# Altium footprint library Miscellaneous Header.PcbLib: 164 footprints (part 3 of 11)
Each footprint in its own frame and in the unit in brackets; x right, y up, seen from the top. Pads: shape width x height; smd on the part's side, far side on the other; paste and mask are expansions set on the pad; w line width, h text height; cw(c..) or ccw(c..) is an arc to the next point about the centre after c.
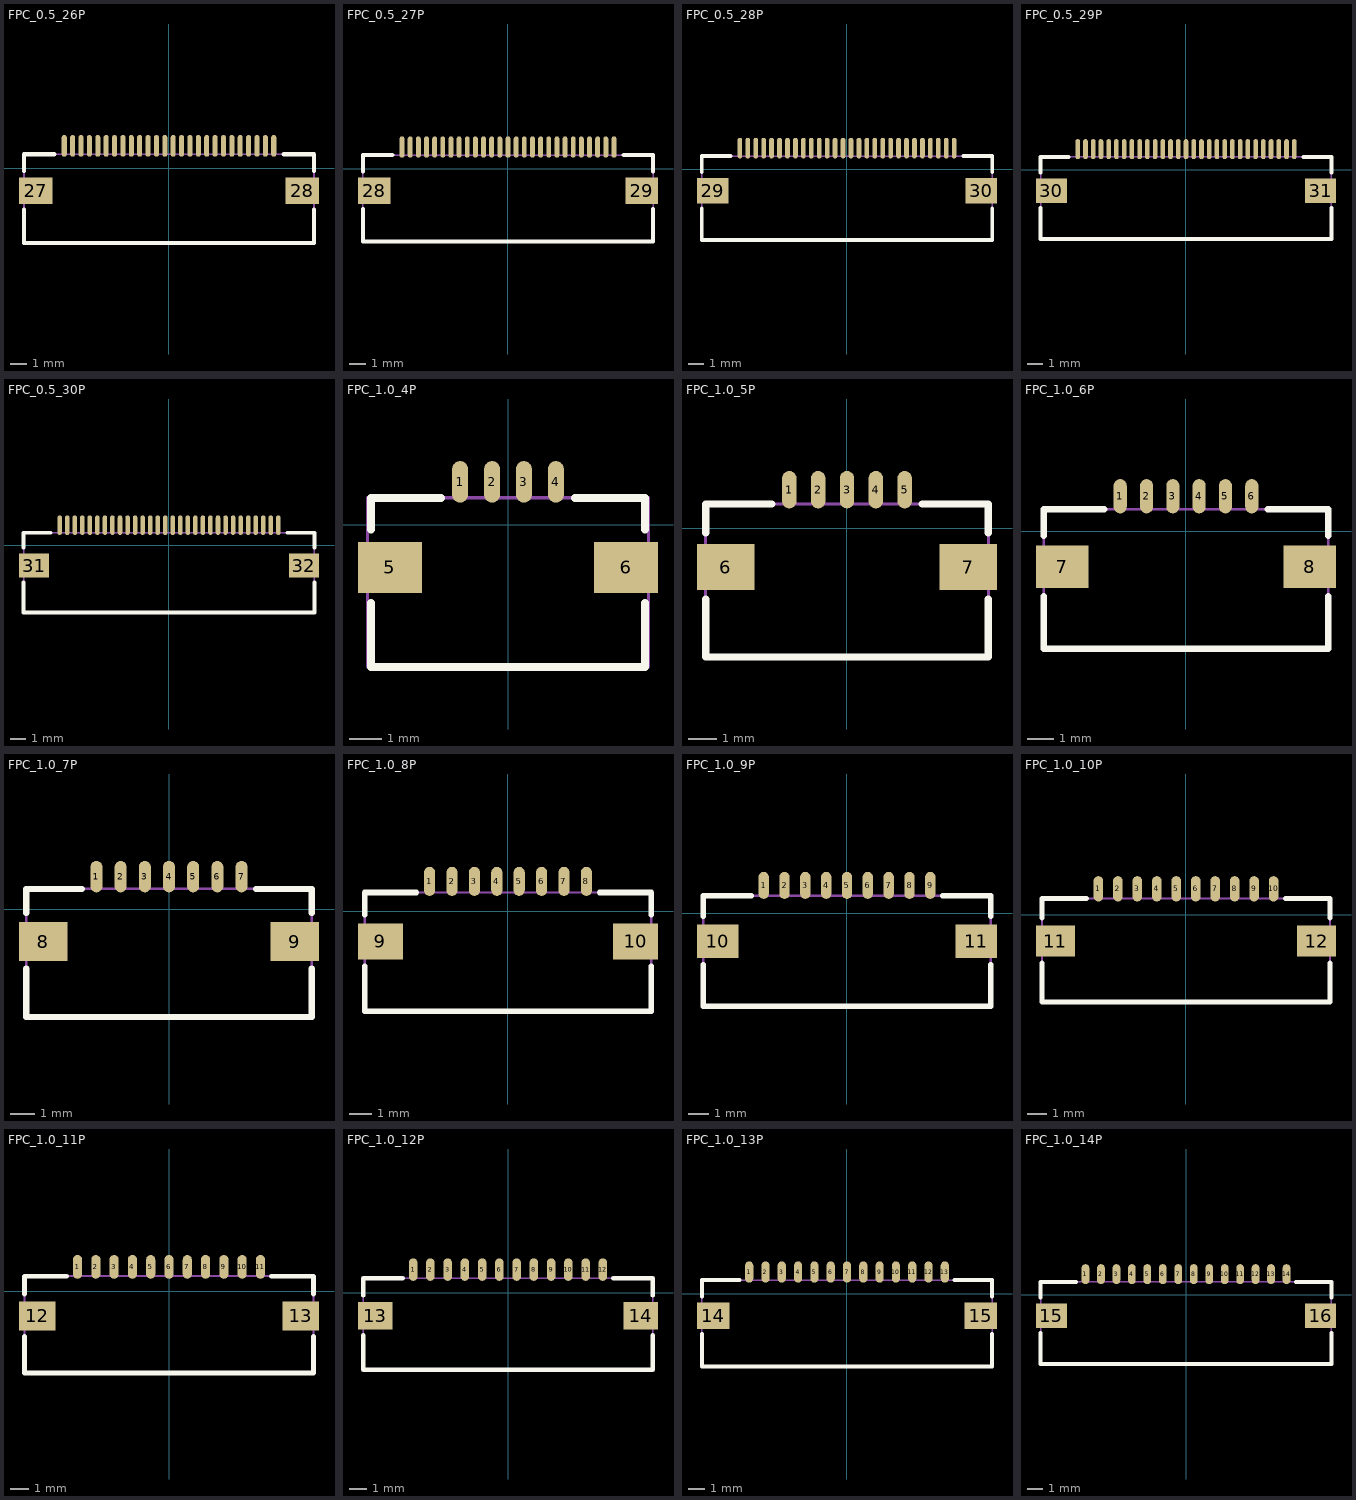
[diagram p2: the footprints below, top view; thin cyan lines are the x and y axes]

## FPC_0.5_26P [mm]
pads (28):
  oval 0.3x1.3 smd: 1(-6.25,1.34) 2(-5.75,1.34) 3(-5.25,1.34) 4(-4.75,1.34) 5(-4.25,1.34) 6(-3.75,1.34) 7(-3.25,1.34) 8(-2.75,1.34) 9(-2.25,1.34) 10(-1.75,1.34) 11(-1.25,1.34) 12(-0.75,1.34) 13(-0.25,1.34) 14(0.25,1.34) 15(0.75,1.34) 16(1.25,1.34) 17(1.75,1.34) 18(2.25,1.34) 19(2.75,1.34) 20(3.25,1.34) 21(3.75,1.34) 22(4.25,1.34) 23(4.75,1.34) 24(5.25,1.34) 25(5.75,1.34) 26(6.25,1.34)
  rect 2x1.6 smd: 27(-7.95,-1.34) 28(7.95,-1.34)
Top Overlay:
  lines w0.25: -8.65,-2.46 -8.65,-4.46 8.65,-4.46 8.65,-2.46 ; -8.65,-0.16 -8.65,0.84 -6.85,0.84 ; 6.85,0.84 8.65,0.84 8.65,-0.16
Mechanical 15:
  lines w0.1: -8.65,-4.46 8.65,-4.46 8.65,0.84 -8.65,0.84 -8.65,-4.46
3D body: height 2.2, standoff -0.05, extent -8.55,-4.799 8.55,1.7

## FPC_0.5_27P [mm]
pads (29):
  oval 0.3x1.3 smd: 1(-6.5,1.34) 2(-6,1.34) 3(-5.5,1.34) 4(-5,1.34) 5(-4.5,1.34) 6(-4,1.34) 7(-3.5,1.34) 8(-3,1.34) 9(-2.5,1.34) 10(-2,1.34) 11(-1.5,1.34) 12(-1,1.34) 13(-0.5,1.34) 14(0,1.34) 15(0.5,1.34) 16(1,1.34) 17(1.5,1.34) 18(2,1.34) 19(2.5,1.34) 20(3,1.34) 21(3.5,1.34) 22(4,1.34) 23(4.5,1.34) 24(5,1.34) 25(5.5,1.34) 26(6,1.34) 27(6.5,1.34)
  rect 2x1.6 smd: 28(-8.2,-1.34) 29(8.2,-1.34)
Top Overlay:
  lines w0.25: -8.9,-2.46 -8.9,-4.46 8.9,-4.46 8.9,-2.46 ; -8.9,-0.16 -8.9,0.84 -7.1,0.84 ; 7.1,0.84 8.9,0.84 8.9,-0.16
Mechanical 15:
  lines w0.1: -8.9,-4.46 -8.9,0.84 8.9,0.84 8.9,-4.46 -8.9,-4.46
3D body: height 2.2, standoff -0.05, extent -8.8,-4.799 8.8,1.7

## FPC_0.5_28P [mm]
pads (30):
  oval 0.3x1.3 smd: 1(-6.75,1.34) 2(-6.25,1.34) 3(-5.75,1.34) 4(-5.25,1.34) 5(-4.75,1.34) 6(-4.25,1.34) 7(-3.75,1.34) 8(-3.25,1.34) 9(-2.75,1.34) 10(-2.25,1.34) 11(-1.75,1.34) 12(-1.25,1.34) 13(-0.75,1.34) 14(-0.25,1.34) 15(0.25,1.34) 16(0.75,1.34) 17(1.25,1.34) 18(1.75,1.34) 19(2.25,1.34) 20(2.75,1.34) 21(3.25,1.34) 22(3.75,1.34) 23(4.25,1.34) 24(4.75,1.34) 25(5.25,1.34) 26(5.75,1.34) 27(6.25,1.34) 28(6.75,1.34)
  rect 2x1.6 smd: 29(-8.45,-1.34) 30(8.45,-1.34)
Top Overlay:
  lines w0.25: -9.15,-2.46 -9.15,-4.46 9.15,-4.46 9.15,-2.46 ; -9.15,-0.16 -9.15,0.84 -7.35,0.84 ; 7.35,0.84 9.15,0.84 9.15,-0.16
Mechanical 15:
  lines w0.1: -9.15,-4.46 9.15,-4.46 9.15,0.84 -9.15,0.84 -9.15,-4.46
3D body: height 2.2, standoff -0.05, extent -9.05,-4.799 9.05,1.7

## FPC_0.5_29P [mm]
pads (31):
  oval 0.3x1.3 smd: 1(-7,1.34) 2(-6.5,1.34) 3(-6,1.34) 4(-5.5,1.34) 5(-5,1.34) 6(-4.5,1.34) 7(-4,1.34) 8(-3.5,1.34) 9(-3,1.34) 10(-2.5,1.34) 11(-2,1.34) 12(-1.5,1.34) 13(-1,1.34) 14(-0.5,1.34) 15(0,1.34) 16(0.5,1.34) 17(1,1.34) 18(1.5,1.34) 19(2,1.34) 20(2.5,1.34) 21(3,1.34) 22(3.5,1.34) 23(4,1.34) 24(4.5,1.34) 25(5,1.34) 26(5.5,1.34) 27(6,1.34) 28(6.5,1.34) 29(7,1.34)
  rect 2x1.6 smd: 30(-8.7,-1.34) 31(8.7,-1.34)
Top Overlay:
  lines w0.25: -9.4,-2.46 -9.4,-4.46 9.4,-4.46 9.4,-2.46 ; -9.4,-0.16 -9.4,0.84 -7.6,0.84 ; 7.6,0.84 9.4,0.84 9.4,-0.16
Mechanical 15:
  lines w0.1: -9.4,-4.46 -9.4,0.84 9.4,0.84 9.4,-4.46 -9.4,-4.46
3D body: height 2.2, standoff -0.05, extent -9.3,-4.799 9.3,1.7

## FPC_0.5_30P [mm]
pads (32):
  oval 0.3x1.3 smd: 1(-7.25,1.34) 2(-6.75,1.34) 3(-6.25,1.34) 4(-5.75,1.34) 5(-5.25,1.34) 6(-4.75,1.34) 7(-4.25,1.34) 8(-3.75,1.34) 9(-3.25,1.34) 10(-2.75,1.34) 11(-2.25,1.34) 12(-1.75,1.34) 13(-1.25,1.34) 14(-0.75,1.34) 15(-0.25,1.34) 16(0.25,1.34) 17(0.75,1.34) 18(1.25,1.34) 19(1.75,1.34) 20(2.25,1.34) 21(2.75,1.34) 22(3.25,1.34) 23(3.75,1.34) 24(4.25,1.34) 25(4.75,1.34) 26(5.25,1.34) 27(5.75,1.34) 28(6.25,1.34) 29(6.75,1.34) 30(7.25,1.34)
  rect 2x1.6 smd: 31(-8.95,-1.34) 32(8.95,-1.34)
Top Overlay:
  lines w0.25: -9.65,-2.46 -9.65,-4.46 9.65,-4.46 9.65,-2.46 ; -9.65,-0.16 -9.65,0.84 -7.85,0.84 ; 7.85,0.84 9.65,0.84 9.65,-0.16
Mechanical 15:
  lines w0.1: -9.65,-4.46 9.65,-4.46 9.65,0.84 -9.65,0.84 -9.65,-4.46
3D body: height 2.2, standoff -0.05, extent -9.55,-4.799 9.55,1.7

## FPC_1.0_4P [mm]
pads (6):
  oval 0.5x1.3 smd: 1(-1.5,1.34) 2(-0.5,1.34) 3(0.5,1.34) 4(1.5,1.34)
  rect 2x1.6 smd: 5(-3.7,-1.34) 6(3.7,-1.34)
Top Overlay:
  lines w0.25: -4.3,-2.46 -4.3,-4.46 4.3,-4.46 4.3,-2.46 ; -4.3,-0.16 -4.3,0.84 -2.1,0.84 ; 2.1,0.84 4.3,0.84 4.3,-0.16
Mechanical 15:
  lines w0.1: -4.4,-4.46 -4.4,0.84 4.4,0.84 4.4,-4.46 -4.4,-4.46
3D body: height 2.2, standoff -0.05, extent -4.3,-4.86 4.3,1.639

## FPC_1.0_5P [mm]
pads (7):
  oval 0.5x1.3 smd: 1(-2,1.34) 2(-1,1.34) 3(0,1.34) 4(1,1.34) 5(2,1.34)
  rect 2x1.6 smd: 6(-4.2,-1.34) 7(4.2,-1.34)
Top Overlay:
  lines w0.25: -4.9,-2.46 -4.9,-4.46 4.9,-4.46 4.9,-2.46 ; -4.9,-0.16 -4.9,0.84 -2.6,0.84 ; 2.6,0.84 4.9,0.84 4.9,-0.16
Mechanical 15:
  lines w0.1: -4.9,-4.46 -4.9,0.84 4.9,0.84 4.9,-4.46 -4.9,-4.46
3D body: height 2.2, standoff -0.05, extent -4.8,-4.86 4.8,1.639

## FPC_1.0_6P [mm]
pads (8):
  oval 0.5x1.3 smd: 1(-2.5,1.34) 2(-1.5,1.34) 3(-0.5,1.34) 4(0.5,1.34) 5(1.5,1.34) 6(2.5,1.34)
  rect 2x1.6 smd: 7(-4.7,-1.34) 8(4.7,-1.34)
Top Overlay:
  lines w0.25: -5.4,-2.46 -5.4,-4.46 5.4,-4.46 5.4,-2.46 ; -5.4,-0.16 -5.4,0.84 -3.1,0.84 ; 3.1,0.84 5.4,0.84 5.4,-0.16
Mechanical 15:
  lines w0.1: -5.4,-4.46 -5.4,0.84 5.4,0.84 5.4,-4.46 -5.4,-4.46
3D body: height 2.2, standoff -0.05, extent -5.3,-4.86 5.3,1.639

## FPC_1.0_7P [mm]
pads (9):
  oval 0.5x1.3 smd: 1(-3,1.34) 2(-2,1.34) 3(-1,1.34) 4(0,1.34) 5(1,1.34) 6(2,1.34) 7(3,1.34)
  rect 2x1.6 smd: 8(-5.2,-1.34) 9(5.2,-1.34)
Top Overlay:
  lines w0.25: -5.9,-2.46 -5.9,-4.46 5.9,-4.46 5.9,-2.46 ; -5.9,-0.16 -5.9,0.84 -3.6,0.84 ; 3.6,0.84 5.9,0.84 5.9,-0.16
Mechanical 15:
  lines w0.1: -5.9,-4.46 5.9,-4.46 5.9,0.84 -5.9,0.84 -5.9,-4.46
3D body: height 2.2, standoff -0.05, extent -5.8,-4.86 5.8,1.639

## FPC_1.0_8P [mm]
pads (10):
  oval 0.5x1.3 smd: 1(-3.5,1.34) 2(-2.5,1.34) 3(-1.5,1.34) 4(-0.5,1.34) 5(0.5,1.34) 6(1.5,1.34) 7(2.5,1.34) 8(3.5,1.34)
  rect 2x1.6 smd: 9(-5.7,-1.34) 10(5.7,-1.34)
Top Overlay:
  lines w0.25: -6.4,-2.46 -6.4,-4.46 6.4,-4.46 6.4,-2.46 ; -6.4,-0.16 -6.4,0.84 -4.1,0.84 ; 4.1,0.84 6.4,0.84 6.4,-0.16
Mechanical 15:
  lines w0.1: -6.4,-4.46 -6.4,0.84 6.4,0.84 6.4,-4.46 -6.4,-4.46
3D body: height 2.2, standoff -0.05, extent -6.3,-4.86 6.3,1.639

## FPC_1.0_9P [mm]
pads (11):
  oval 0.5x1.3 smd: 1(-4,1.34) 2(-3,1.34) 3(-2,1.34) 4(-1,1.34) 5(0,1.34) 6(1,1.34) 7(2,1.34) 8(3,1.34) 9(4,1.34)
  rect 2x1.6 smd: 10(-6.2,-1.34) 11(6.2,-1.34)
Top Overlay:
  lines w0.25: -6.9,-2.46 -6.9,-4.46 6.9,-4.46 6.9,-2.46 ; -6.9,-0.16 -6.9,0.84 -4.6,0.84 ; 4.6,0.84 6.9,0.84 6.9,-0.16
Mechanical 15:
  lines w0.1: -6.9,-4.46 6.9,-4.46 6.9,0.84 -6.9,0.84 -6.9,-4.46
3D body: height 2.2, standoff -0.05, extent -6.8,-4.86 6.8,1.639

## FPC_1.0_10P [mm]
pads (12):
  oval 0.5x1.3 smd: 1(-4.5,1.34) 2(-3.5,1.34) 3(-2.5,1.34) 4(-1.5,1.34) 5(-0.5,1.34) 6(0.5,1.34) 7(1.5,1.34) 8(2.5,1.34) 9(3.5,1.34) 10(4.5,1.34)
  rect 2x1.6 smd: 11(-6.7,-1.34) 12(6.7,-1.34)
Top Overlay:
  lines w0.25: -7.4,-2.46 -7.4,-4.46 7.4,-4.46 7.4,-2.46 ; -7.4,-0.16 -7.4,0.84 -5.1,0.84 ; 5.1,0.84 7.4,0.84 7.4,-0.16
Mechanical 15:
  lines w0.1: -7.4,-4.46 -7.4,0.84 7.4,0.84 7.4,-4.46 -7.4,-4.46
3D body: height 2.2, standoff -0.05, extent -7.3,-4.86 7.3,1.639

## FPC_1.0_11P [mm]
pads (13):
  oval 0.5x1.3 smd: 1(-5,1.34) 2(-4,1.34) 3(-3,1.34) 4(-2,1.34) 5(-1,1.34) 6(0,1.34) 7(1,1.34) 8(2,1.34) 9(3,1.34) 10(4,1.34) 11(5,1.34)
  rect 2x1.6 smd: 12(-7.2,-1.34) 13(7.2,-1.34)
Top Overlay:
  lines w0.25: -7.9,-2.46 -7.9,-4.46 7.9,-4.46 7.9,-2.46 ; -7.9,-0.16 -7.9,0.84 -5.6,0.84 ; 5.6,0.84 7.9,0.84 7.9,-0.16
Mechanical 15:
  lines w0.1: -7.9,-4.46 7.9,-4.46 7.9,0.84 -7.9,0.84 -7.9,-4.46
3D body: height 2.2, standoff -0.05, extent -7.8,-4.86 7.8,1.639

## FPC_1.0_12P [mm]
pads (14):
  oval 0.5x1.3 smd: 1(-5.5,1.34) 2(-4.5,1.34) 3(-3.5,1.34) 4(-2.5,1.34) 5(-1.5,1.34) 6(-0.5,1.34) 7(0.5,1.34) 8(1.5,1.34) 9(2.5,1.34) 10(3.5,1.34) 11(4.5,1.34) 12(5.5,1.34)
  rect 2x1.6 smd: 13(-7.7,-1.34) 14(7.7,-1.34)
Top Overlay:
  lines w0.25: -8.4,-2.46 -8.4,-4.46 8.4,-4.46 8.4,-2.46 ; -8.4,-0.16 -8.4,0.84 -6.1,0.84 ; 6.1,0.84 8.4,0.84 8.4,-0.16
Mechanical 15:
  lines w0.1: -8.4,-4.46 -8.4,0.84 8.4,0.84 8.4,-4.46 -8.4,-4.46
3D body: height 2.2, standoff -0.05, extent -8.3,-4.86 8.3,1.639

## FPC_1.0_13P [mm]
pads (15):
  oval 0.5x1.3 smd: 1(-6,1.34) 2(-5,1.34) 3(-4,1.34) 4(-3,1.34) 5(-2,1.34) 6(-1,1.34) 7(0,1.34) 8(1,1.34) 9(2,1.34) 10(3,1.34) 11(4,1.34) 12(5,1.34) 13(6,1.34)
  rect 2x1.6 smd: 14(-8.2,-1.34) 15(8.2,-1.34)
Top Overlay:
  lines w0.25: -8.9,-2.46 -8.9,-4.46 8.9,-4.46 8.9,-2.46 ; -8.9,-0.16 -8.9,0.84 -6.6,0.84 ; 6.6,0.84 8.9,0.84 8.9,-0.16
Mechanical 15:
  lines w0.1: -8.9,-4.46 -8.9,0.84 8.9,0.84 8.9,-4.46 -8.9,-4.46
3D body: height 2.2, standoff -0.05, extent -8.8,-4.86 8.8,1.639

## FPC_1.0_14P [mm]
pads (16):
  oval 0.5x1.3 smd: 1(-6.5,1.34) 2(-5.5,1.34) 3(-4.5,1.34) 4(-3.5,1.34) 5(-2.5,1.34) 6(-1.5,1.34) 7(-0.5,1.34) 8(0.5,1.34) 9(1.5,1.34) 10(2.5,1.34) 11(3.5,1.34) 12(4.5,1.34) 13(5.5,1.34) 14(6.5,1.34)
  rect 2x1.6 smd: 15(-8.7,-1.34) 16(8.7,-1.34)
Top Overlay:
  lines w0.25: -9.4,-2.46 -9.4,-4.46 9.4,-4.46 9.4,-2.46 ; -9.4,-0.16 -9.4,0.84 -7.1,0.84 ; 7.1,0.84 9.4,0.84 9.4,-0.16
Mechanical 15:
  lines w0.1: -9.4,-4.46 9.4,-4.46 9.4,0.84 -9.4,0.84 -9.4,-4.46
3D body: height 2.2, standoff -0.05, extent -9.3,-4.86 9.3,1.639